# Altium footprint library zulu_a7.PcbLib: 11 footprints
Each footprint in its own frame and in the unit in brackets; x right, y up, seen from the top. Pads: shape width x height; smd on the part's side, far side on the other; paste and mask are expansions set on the pad; w line width, h text height; cw(c..) or ccw(c..) is an arc to the next point about the centre after c.
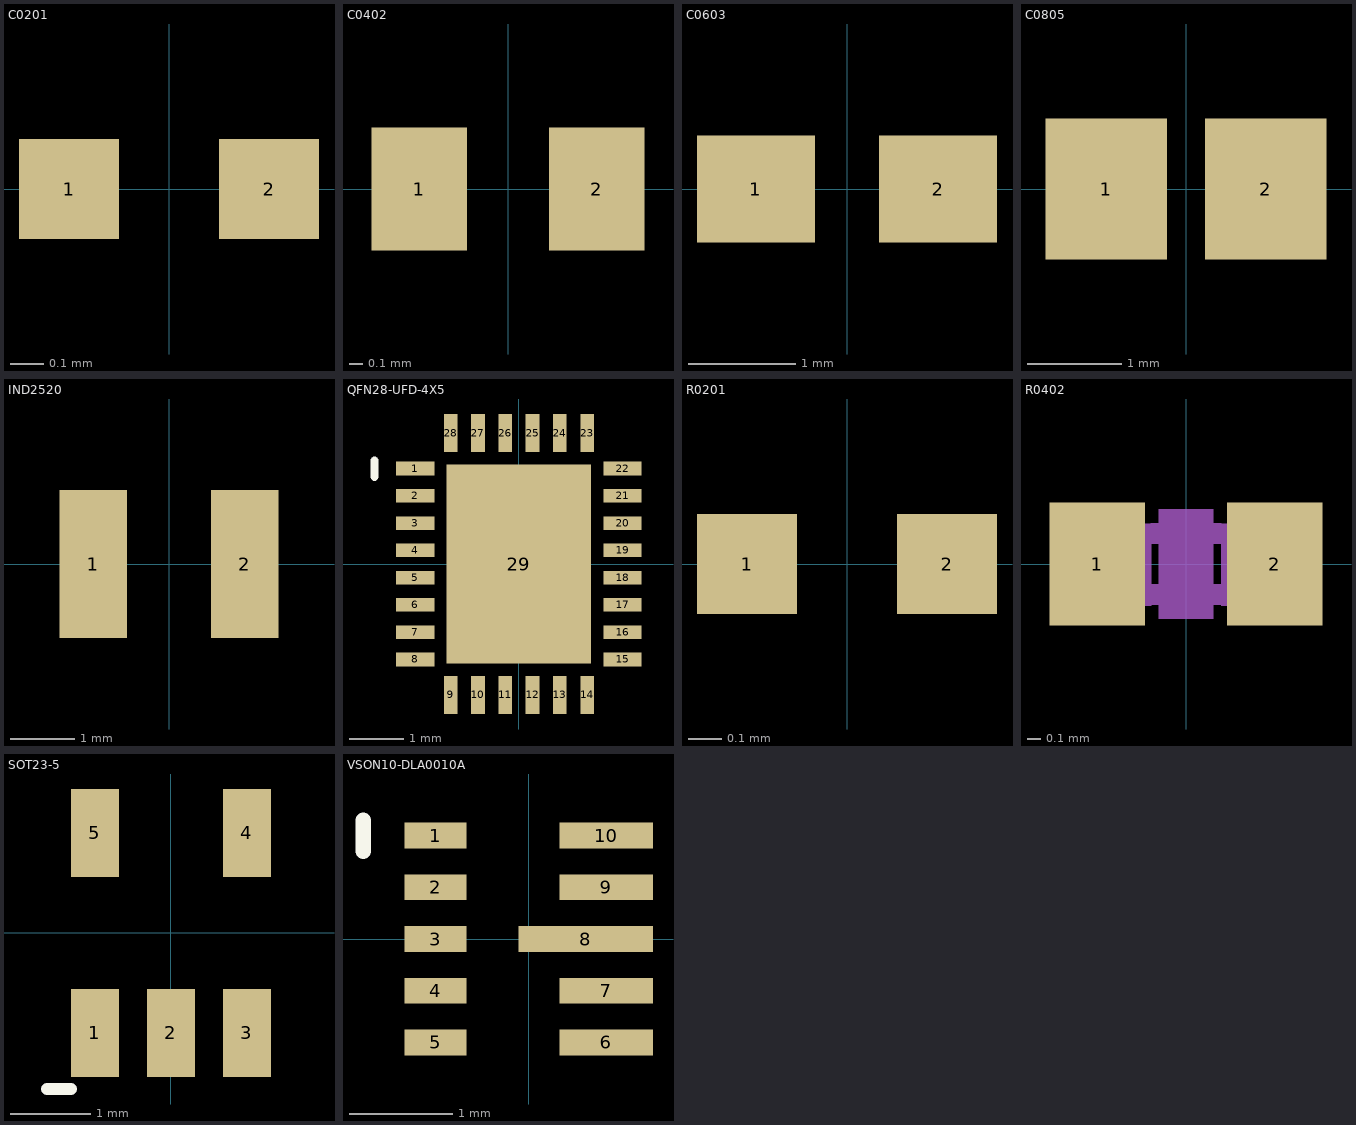
[diagram p0: the footprints below, top view; thin cyan lines are the x and y axes]

## C0201 [mm] "0201 capacitor, 0.30 x 0.30 pads on 0.60 pitch"
height 0.33
pads (2):
  rect 0.3x0.3 smd: 1(-0.3,0) 2(0.3,0)

## C0402 [mm] "0402 capacitor, 0.70 x 0.90 pads on 1.30 pitch"
height 0.55
pads (2):
  rect 0.7x0.9 smd: 1(-0.65,0) 2(0.65,0)

## C0603 [mm] "0603 capacitor, 1.10 x 1.00 pads on 1.70 pitch (as asar_feather.PcbLib)"
height 0.9
pads (2):
  rect 1.1x1 smd: 1(-0.85,0) 2(0.85,0)

## C0805 [mm] "0805 capacitor, 1.30 x 1.50 pads on 1.70 pitch (as asar_feather.PcbLib)"
height 1.25
pads (2):
  rect 1.3x1.5 smd: 1(-0.85,0) 2(0.85,0)

## IND2520 [mm] "2520 inductor (Murata DFE2520), 1.05 x 2.30 pads on 2.35 pitch"
height 1.2
pads (2):
  rect 1.05x2.3 smd: 1(-1.175,0) 2(1.175,0)

## PCBComponent_1 [mm]

## QFN28-UFD-4X5 [mm] "UFD 28-lead QFN 4 x 5 mm, 0.5 pitch, exposed pad 2.65 x 3.65 (pad 29 = GND); LTC DWG 05-08-1712 Rev B recommended pads"
height 0.75
pads (29):
  rect 0.7x0.25 smd: 1(-1.9,1.75) 2(-1.9,1.25) 3(-1.9,0.75) 4(-1.9,0.25) 5(-1.9,-0.25) 6(-1.9,-0.75) 7(-1.9,-1.25) 8(-1.9,-1.75) 15(1.9,-1.75) 16(1.9,-1.25) 17(1.9,-0.75) 18(1.9,-0.25) 19(1.9,0.25) 20(1.9,0.75) 21(1.9,1.25) 22(1.9,1.75)
  rect 0.25x0.7 smd: 9(-1.25,-2.4) 10(-0.75,-2.4) 11(-0.25,-2.4) 12(0.25,-2.4) 13(0.75,-2.4) 14(1.25,-2.4) 23(1.25,2.4) 24(0.75,2.4) 25(0.25,2.4) 26(-0.25,2.4) 27(-0.75,2.4) 28(-1.25,2.4)
  rect 2.65x3.65 smd: 29(0,0)
Top Overlay:
  lines w0.15: -2.65,1.6 -2.65,1.9

## R0201 [mm] "0201 resistor, 0.30 x 0.30 pads on 0.60 pitch"
height 0.26
pads (2):
  rect 0.3x0.3 smd: 1(-0.3,0) 2(0.3,0)

## R0402 [mm] "R0402"
pads (2):
  rect 0.7x0.9 smd: 1(-0.65,0) 2(0.65,0)
Mechanical 4:
  region: -0.554,-0.305 -0.554,0.295 -0.254,0.295 -0.254,-0.305
  region: 0.259,-0.305 0.259,0.295 0.559,0.295 0.559,-0.305
  lines w0.152: -0.245,-0.224 0.245,-0.224 ; -0.245,0.224 0.245,0.224
Bottom Glue Points:
  region: -0.2,-0.4 -0.2,0.4 0.2,0.4 0.2,-0.4

## SOT23-5 [mm] "SOT23-5 (Semtech SC189xSKTRT land, datasheet p.23): 0.95 pitch, pads 0.60 x 1.10, rows 2.50 apart; pins 1-3 one side, 4 opposite 3, 5 opposite 1 (as asar_feather.PcbLib)"
height 1.45
pads (5):
  rect 0.6x1.1 smd: 1(-0.95,-1.25) 2(0,-1.25) 3(0.95,-1.25) 4(0.95,1.25) 5(-0.95,1.25)
Top Overlay:
  lines w0.15: -1.55,-1.95 -1.25,-1.95

## VSON10-DLA0010A [mm] "TI VSON-HR 10 (DLA0010A) 2.0 x 3.0 mm 0.5 pitch, TPS63802; TI land pattern 4223750/D"
height 1
pads (10):
  rect 0.6x0.25 smd: 1(-0.9,1) 2(-0.9,0.5) 3(-0.9,0) 4(-0.9,-0.5) 5(-0.9,-1)
  rect 0.9x0.25 smd: 6(0.75,-1) 7(0.75,-0.5) 9(0.75,0.5) 10(0.75,1)
  rect 1.3x0.25 smd: 8(0.55,0)
Top Overlay:
  lines w0.15: -1.6,0.85 -1.6,1.15